# Altium footprint library KM_ALTIUM.PcbLib: 265 footprints (part 9 of 17)
Each footprint in its own frame and in the unit in brackets; x right, y up, seen from the top. Pads: shape width x height; smd on the part's side, far side on the other; paste and mask are expansions set on the pad; w line width, h text height; cw(c..) or ccw(c..) is an arc to the next point about the centre after c.
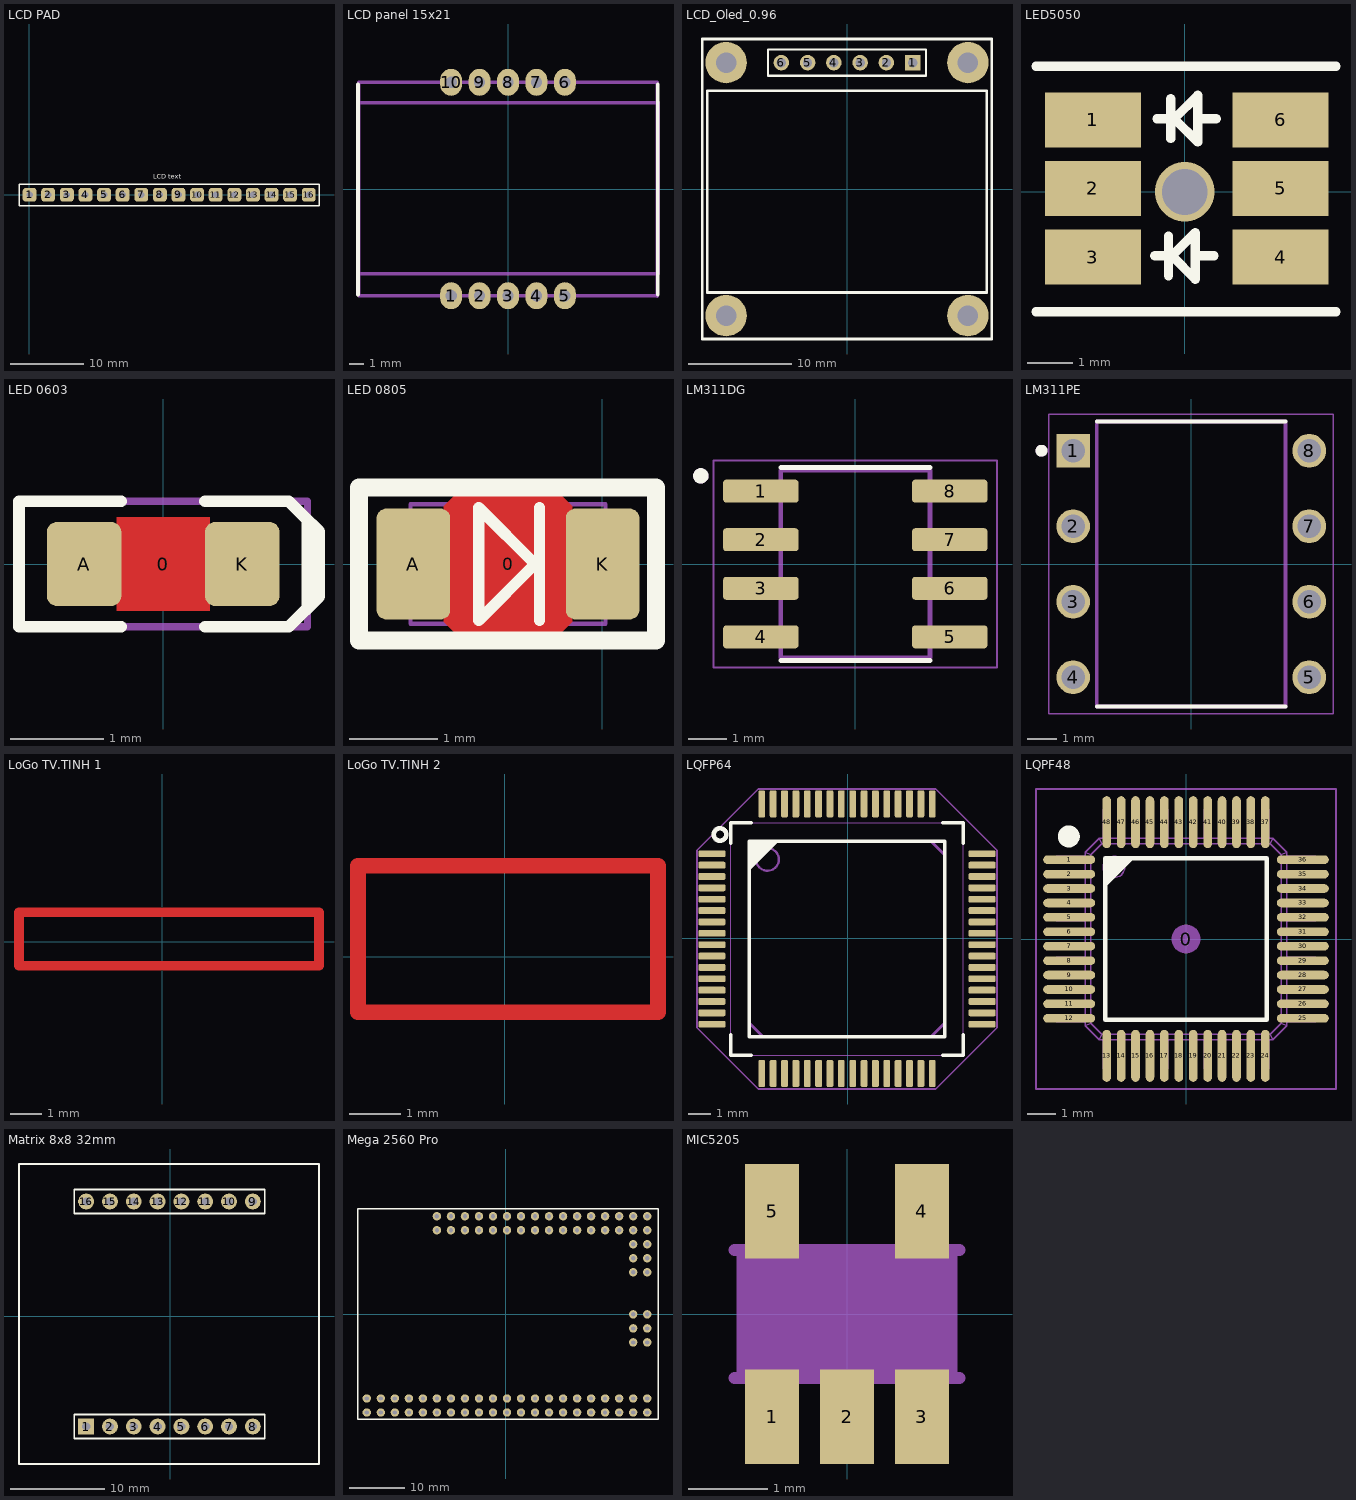
[diagram p8: the footprints below, top view; thin cyan lines are the x and y axes]

## LCD PAD [mm]
pads (16):
  rrect50% 1.905x1.905 hole 0.9: 1(0.025,0) 2(2.565,0) 3(5.105,0) 4(7.645,0) 5(10.185,0) 6(12.725,0) 7(15.265,0) 8(17.805,0) 9(20.345,0) 10(22.885,0) 11(25.425,0) 12(27.965,0) 13(30.505,0) 14(33.045,0) 15(35.585,0) 16(38.125,0)
Top Overlay:
  lines w0.2: -1.422,-1.499 39.522,-1.499 39.522,1.422 0.813,1.422 -1.422,1.422 -1.422,-1.499
  text "LCD text" at 16.891,1.93 h1.14

## LCD panel 15x21 [mm]
pads (10):
  oval 1.524x1.9 hole 0.8: 1(-4,-7.5) 2(-2,-7.5) 3(0,-7.5) 4(2,-7.5) 5(4,-7.5) 6(4,7.5) 7(2,7.5) 8(0,7.5) 9(-2,7.5) 10(-4,7.5)
Top Overlay:
  lines w0.254: -10.541,-7.417 -10.541,7.366 ; 10.516,-7.417 10.516,7.366
Mechanical 1:
  lines w0.254: -10.5,-7.5 -10.5,7.5 10.5,7.5 10.5,-7.518 10.482,-7.5 -10.5,-7.5
Mechanical 3:
  lines w0.254: -10.541,-5.944 10.541,-5.944 10.541,6.045 10.516,6.071 -10.541,6.071 -10.541,-5.944
3D body: height 3, standoff 2.8, extent -10.516,-5.969 10.566,6.096
3D body: height 2.8, standoff 2.3, extent -10.516,-7.569 10.465,7.518

## LCD_Oled_0.96 [mm]
pads (10):
  rect 1.5x1.5 hole 0.9: 1(6.35,12.217)
  round 1.5 hole 0.9: 2(3.81,12.217) 3(1.27,12.217) 4(-1.27,12.217) 5(-3.81,12.217) 6(-6.35,12.217)
  round 4 hole 2: ""(-11.684,-12.243) ""(-11.684,12.217) ""(11.684,-12.243) ""(11.684,12.217)
Top Overlay:
  lines w0.2: -7.62,10.947 -7.62,13.487 7.62,13.487 7.62,10.947 -7.62,10.947
  lines w0.254: -14,-14.5 -14,14.5 14,14.5 14,-14.5 -13.997,-14.5 ; -13.5,-10 -13.5,9.5 13.5,9.5 13.5,-10 -13.5,-10
3D body "User Library-128x64I2COLEDDisplayAdafruit.STEP": height 10.47, standoff -0.37, extent -13.299,-13.331 13.401,14.529

## LED5050 [mm]
pads (6):
  rect 2.1x1.2 smd: 1(-2.007,1.575) 2(-2.007,0.075) 3(-2.007,-1.425) 4(2.093,-1.425) 5(2.093,0.075) 6(2.093,1.575)
via 0,0 diameter 1.3 hole 1
Top Overlay:
  lines w0.203: -3.251,-2.616 3.302,-2.616 ; -3.251,2.743 3.302,2.743 ; -0.66,-1.397 -0.279,-1.397 ; -0.61,1.6 -0.229,1.6 ; -0.356,-1.829 -0.356,-0.965 ; -0.305,1.168 -0.305,2.032 ; 0.229,-1.397 0.635,-1.397 ; 0.279,1.6 0.686,1.6 ; -0.279,-1.397 0.229,-0.889 0.229,-1.905 -0.279,-1.397 ; -0.229,1.6 0.279,1.092 0.279,2.108 -0.229,1.6
3D body "User Library-LED5050.step": height 1.41, standoff -0.14, extent -2.598,-2.435 2.902,2.565

## LED 0603 [mm]
pads (3):
  round 0.254 on Mech15: 0(0,0)
  rrect25% 0.8x0.9 smd: A(-0.85,0) K(0.85,0)
Top Layer:
  pour cut-out: -0.5,0.5 0.5,0.5 0.5,-0.5 -0.5,-0.5
Top Overlay:
  lines w0.127: -0.45,-0.675 -1.55,-0.675 -1.55,0.675 -0.45,0.675 ; 0.45,-0.675 1.35,-0.675 1.55,-0.475 1.55,0.475 1.35,0.675 0.45,0.675 ; 1.5,0.525 1.675,0.35 1.675,-0.35 1.525,-0.5
Mechanical 13:
  lines w0.05: -0.6,-0.4 -0.6,0.399 0.6,0.4 0.6,-0.4 -0.6,-0.399 ; -0.505,-0.398 -0.505,0.398 ; -0.5,-0.4 -0.8,-0.4 -0.8,0.4 -0.5,0.4 ; 0.5,-0.4 0.8,-0.4 0.8,0.4 0.5,0.4 ; 0.505,-0.398 0.505,0.398 ; -0.599,-0.398 -0.599,0.398 0.599,0.398 0.599,-0.398 -0.599,-0.398
Mechanical 15:
  lines w0.076: -1.55,-0.675 1.55,-0.675 1.55,0.675 -1.55,0.675 -1.55,-0.675
3D body "LED 0603 APT1608 RED.STEP": height 0.75, standoff 0, extent -0.8,-0.4 0.8,0.4

## LED 0805 [mm] "LED SMD, Body 2.0x1.2mm, EIA 0805, IPC Medium Density"
height 0.7
pads (3):
  round 0.254 on Mech15: 0(-1.061,0)
  rrect25% 0.83x1.25 smd: A(-2.128,0) K(0.006,0)
Top Layer:
  pour cut-out: -1.786,0.65 -1.586,0.85 -0.536,0.85 -0.336,0.65 -0.336,-0.65 -0.536,-0.85 -1.586,-0.85 -1.786,-0.65
Top Overlay:
  lines w0.127: -0.705,-0.635 -0.705,0.635 ; -0.705,0 -0.756,0 ; -0.756,0 -1.391,0.635 -1.391,-0.635 -0.756,0
  lines w0.203: -2.743,-0.864 -2.743,0.864 0.61,0.864 0.61,-0.864 -2.743,-0.864
Mechanical 13:
  lines w0.05: -0.461,-0.674 -1.661,-0.674 -0.461,-0.674 ; -0.461,0.675 0.039,0.675 0.039,-0.675 -0.461,-0.675 -0.461,0.675 ; -0.461,0.674 -1.661,0.673 -0.461,0.674 ; -2.161,-0.675 -1.661,-0.675 -1.661,0.675 -2.161,0.675 -2.161,-0.675
Mechanical 15:
  lines w0.1: -2.743,-0.864 0.584,-0.864 0.584,0.838 -2.743,0.838 -2.743,-0.864
3D body "User Library-led_0805-blue.step": height 1.1, standoff 0, extent -2.071,-0.625 -0.051,0.625

## Lithium [mm]
3D body "3.7v li-ion 500mah Battery.step": height 8.36, standoff 2.31, extent -18.886,-24.8 18.886,24.8

## LM311DG [mm]
pads (8):
  rrect25% 1.97x0.6 smd: 1(-2.47,1.905) 2(-2.47,0.635) 3(-2.47,-0.635) 4(-2.47,-1.905) 5(2.47,-1.905) 6(2.47,-0.635) 7(2.47,0.635) 8(2.47,1.905)
Top Overlay:
  circle w0.2: c-4.04,2.305 r0.1
  lines w0.127: -1.95,-2.525 1.95,-2.525 ; -1.95,2.525 1.95,2.525
Mechanical 13:
  circle w0.2: c-4.04,2.305 r0.1
  lines w0.127: -1.95,-2.452 1.95,-2.452 1.95,2.452 -1.95,2.452 -1.95,-2.452
Mechanical 15:
  lines w0.05: -3.705,-2.702 3.705,-2.702 3.705,2.702 -3.705,2.702 -3.705,-2.702
3D body "step_temp.STEP": height 1.75, standoff 0, extent -2.997,-2.451 2.997,2.451

## LM311PE [mm]
pads (8):
  rect 1.13x1.13 / inner round 1.13 / far side rect 1.13x1.13 hole 0.78: 1(-3.97,3.81)
  round 1.13 hole 0.78: 2(-3.97,1.27) 3(-3.97,-1.27) 4(-3.97,-3.81) 5(3.97,-3.81) 6(3.97,-1.27) 7(3.97,1.27) 8(3.97,3.81)
Top Overlay:
  circle w0.2: c-5.035,3.81 r0.1
  lines w0.127: -3.175,-4.795 3.175,-4.795 ; -3.175,4.795 3.175,4.795
Mechanical 13:
  circle w0.2: c-5.035,3.81 r0.1
  lines w0.127: -3.175,-4.795 -3.175,4.795 3.175,4.795 3.175,-4.795 -3.175,-4.795
Mechanical 15:
  lines w0.05: -4.785,-5.045 -4.785,5.045 4.785,5.045 4.785,-5.045 -4.785,-5.045
3D body "step_temp.STEP": height 5.08, standoff -3.81, extent -3.937,-4.794 3.937,4.794

## LoGo TV.TINH 1 [mm]
Top Layer:
  lines w0.305: -4.572,-0.762 5.004,-0.762 5.004,0.94 -4.572,0.94 -4.572,-0.762
  text "fb.com/tv.tinh" at -4.216,-0.356 h1.52

## LoGo TV.TINH 2 [mm]
Top Layer:
  lines w0.305: -2.87,-1.092 2.997,-1.092 2.997,1.778 -2.87,1.778 -2.87,-1.092
  text "tv.tinh" at -2.083,-0.787 h1.52
  text "fb.com/" at -2.565,0.356 h1.52

## LQFP64 [mm]
pads (64):
  rrect50% 1.2x0.3 smd: 1(-5.969,3.725) 2(-5.969,3.225) 3(-5.969,2.725) 4(-5.969,2.225) 5(-5.969,1.725) 6(-5.969,1.225) 7(-5.969,0.725) 8(-5.969,0.225) 9(-5.969,-0.275) 10(-5.969,-0.775) 11(-5.969,-1.275) 12(-5.969,-1.775) 13(-5.969,-2.275) 14(-5.969,-2.775) 15(-5.969,-3.275) 16(-5.969,-3.775) 33(5.919,-3.775) 34(5.919,-3.275) 35(5.919,-2.775) 36(5.919,-2.275) 37(5.919,-1.775) 38(5.919,-1.275) 39(5.919,-0.775) 40(5.919,-0.275) 41(5.919,0.225) 42(5.919,0.725) 43(5.919,1.225) 44(5.919,1.725) 45(5.919,2.225) 46(5.919,2.725) 47(5.919,3.225) 48(5.919,3.725)
  rrect50% 0.3x1.2 smd: 17(-3.775,-5.944) 18(-3.275,-5.944) 19(-2.775,-5.944) 20(-2.275,-5.944) 21(-1.775,-5.944) 22(-1.275,-5.944) 23(-0.775,-5.944) 24(-0.275,-5.944) 25(0.225,-5.944) 26(0.725,-5.944) 27(1.225,-5.944) 28(1.725,-5.944) 29(2.225,-5.944) 30(2.725,-5.944) 31(3.225,-5.944) 32(3.725,-5.944) 49(3.725,5.919) 50(3.225,5.919) 51(2.725,5.919) 52(2.225,5.919) 53(1.725,5.919) 54(1.225,5.919) 55(0.725,5.919) 56(0.225,5.919) 57(-0.275,5.919) 58(-0.775,5.919) 59(-1.275,5.919) 60(-1.775,5.919) 61(-2.275,5.919) 62(-2.775,5.919) 63(-3.275,5.919) 64(-3.775,5.919)
Top Overlay:
  circle w0.203: c-5.613,4.572 r0.275
  region: -4.319,4.269 -3.031,4.269 -4.319,2.981
  lines w0.152: -5.131,-4.242 -5.131,-5.131 -4.242,-5.131 ; -5.131,4.191 -5.131,5.08 -4.242,5.08 ; 4.191,-5.131 5.08,-5.131 5.08,-4.242 ; 4.191,5.08 5.08,5.08 5.08,4.191 ; -4.325,-4.325 4.275,-4.325 4.275,4.275 -4.325,4.275 -4.325,-4.325
Mechanical 13:
  circle w0.1: c-3.525,3.475 r0.5
  lines w0.127: -4.325,-3.725 -3.725,-4.325 3.675,-4.325 4.275,-3.725 4.275,3.675 3.675,4.275 -3.725,4.275 -4.325,3.675 -4.325,-3.725
Mechanical 15:
  lines w0.076: -6.625,-3.925 -3.925,-6.625 3.875,-6.625 6.575,-3.925 6.575,3.875 3.875,6.575 -3.925,6.575 -6.625,3.875 -6.625,-3.925
Mechanical 16:
  lines w0: -5.131,-5.131 -5.131,5.08 5.08,5.08 5.08,-5.131 -5.131,-5.131
3D body "LQFP50P1200X1200X160-64.STEP": height 1.59, standoff -0.01, extent -6.125,-6.125 6.075,6.075

## LQPF48 [mm]
pads (49):
  round 1 on Mech15: 0(0,0)
  oval 1.8x0.3 smd: 1(-4.05,2.75) 2(-4.05,2.25) 3(-4.05,1.75) 4(-4.05,1.25) 5(-4.05,0.75) 6(-4.05,0.25) 7(-4.05,-0.25) 8(-4.05,-0.75) 9(-4.05,-1.25) 10(-4.05,-1.75) 11(-4.05,-2.25) 12(-4.05,-2.75) 25(4.05,-2.75) 26(4.05,-2.25) 27(4.05,-1.75) 28(4.05,-1.25) 29(4.05,-0.75) 30(4.05,-0.25) 31(4.05,0.25) 32(4.05,0.75) 33(4.05,1.25) 34(4.05,1.75) 35(4.05,2.25) 36(4.05,2.75)
  oval 0.3x1.8 smd: 13(-2.75,-4.05) 14(-2.25,-4.05) 15(-1.75,-4.05) 16(-1.25,-4.05) 17(-0.75,-4.05) 18(-0.25,-4.05) 19(0.25,-4.05) 20(0.75,-4.05) 21(1.25,-4.05) 22(1.75,-4.05) 23(2.25,-4.05) 24(2.75,-4.05) 37(2.75,4.05) 38(2.25,4.05) 39(1.75,4.05) 40(1.25,4.05) 41(0.75,4.05) 42(0.25,4.05) 43(-0.25,4.05) 44(-0.75,4.05) 45(-1.25,4.05) 46(-1.75,4.05) 47(-2.25,4.05) 48(-2.75,4.05)
Top Overlay:
  circle w0.381: c-4.064,3.556 r0.191
  region: -2.794,2.794 -1.794,2.794 -2.794,1.794
  lines w0.152: -2.794,-2.794 2.794,-2.794 2.794,2.794 -2.794,2.794 -2.794,-2.794
Mechanical 13:
  drawing of 361 lines, arcs and shapes, not listed
Mechanical 15:
  lines w0.076: -5.2,-5.2 5.2,-5.2 5.2,5.2 -5.2,5.2 -5.2,-5.2
3D body "LQFP-48.STEP": height 1.59, standoff -0.01, extent -4.5,-4.5 4.5,4.5

## Matrix 8x8 32mm [mm]
pads (16):
  rect 1.7x1.7 hole 0.9: 1(-8.966,-11.771)
  round 1.7 hole 0.9: 2(-6.426,-11.771) 3(-3.886,-11.771) 4(-1.346,-11.771) 5(1.194,-11.771) 6(3.734,-11.771) 7(6.274,-11.771) 8(8.814,-11.771) 9(8.814,12.229) 10(6.274,12.229) 11(3.734,12.229) 12(1.194,12.229) 13(-1.346,12.229) 14(-3.886,12.229) 15(-6.426,12.229) 16(-8.966,12.229)
Top Overlay:
  lines w0.2: -10.236,-13.041 10.084,-13.041 10.084,-10.501 -10.236,-10.501 -10.236,-13.041 ; -10.236,10.959 -10.236,13.499 10.084,13.499 10.084,10.959 -10.236,10.959
  lines w0.254: -16.129,-15.771 15.871,-15.771 15.871,16.229 -16.129,16.229 -16.129,-15.771
3D body "User Library-Bicolor-LED-Matrix.STEP": height 5.51, standoff -8.49, extent -16.127,-15.797 15.873,16.203

## Mega 2560 Pro [mil] "Module"
pads (86):
  round 60 hole 30: 3V3(-692.13,-700) 3V3(-692.13,-600) 5V(-792.13,-700) 5V(-792.13,-600) 5V(1007.87,0) A1(-492.13,600) A2(-392.13,700) A3(-392.13,600) A4(-292.13,700) A5(-292.13,600) A6(-192.13,700) A7(-192.13,600) A8(-92.13,700) A9(-92.13,600) A10(7.87,700) A11(7.87,600) A12(107.87,700) A13(107.87,600) A14(207.87,700) A15(207.87,600) AREF(-592.13,-600) D2(-392.13,-600) D3(-392.13,-700) D4(-292.13,-600) D5(-292.13,-700) D6(-192.13,-600) D7(-192.13,-700) D8(-92.13,-600) D9(-92.13,-700) D10(7.87,-600) D11(7.87,-700) D12(107.87,-600) D13(107.87,-700) D14(207.87,-600) D15(207.87,-700) D16(307.87,-600) D17(307.87,-700) D18(407.87,-600) D19(407.87,-700) D20(507.87,-600) D21(507.87,-700) D22(607.87,-600) D23(607.87,-700) D24(707.87,-600) D25(707.87,-700) D26(807.87,-600) D27(807.87,-700) D28(907.87,-600) D29(907.87,-700) D30(1007.87,-600) D31(1007.87,-700) D32(307.87,700) D33(307.87,600) D34(407.87,700) D35(407.87,600) D36(507.87,700) D37(507.87,600) D38(607.87,700) D39(607.87,600) D40(707.87,700) D41(707.87,600) D42(807.87,700) D43(807.87,600) D44(907.87,700) D45(907.87,600) D46(1007.87,700) D47(1007.87,600) D48(1007.87,500) D49(907.87,500) D50(1007.87,400) D51(907.87,400) D52(1007.87,300) D53(907.87,300) GND(-892.13,-700) GND(-892.13,-600) GND(1007.87,-200) MI(907.87,0) MO(1007.87,-100) RS(907.87,-200) RST(-592.13,-700) RX(-492.13,-600) SCK(907.87,-100) TX(-492.13,-700) VIN(-992.13,-700) VIN(-992.13,-600)
  round 60 hole 31.5: A0(-492.13,700)
Top Overlay:
  lines w10: -1055,-750 -1055,-745 -1055,755 1085,755 1085,-750 -1050,-750 -1055,-750
3D body "MEGA 2560 PRO mini.step": height 502.58, standoff -233.86, extent -1047.25,-750 1078.74,750

## MIC5205 [mm] "KB33-3.3"
pads (5):
  rect 0.69x1.2 smd: 1(-0.95,-1.3) 2(0,-1.3) 3(0.95,-1.3) 4(0.95,1.3) 5(-0.95,1.3)
Mechanical 13:
  region: -0.7,0.85 -1.201,0.85 -1.201,1.5 -0.7,1.5
  region: 1.2,0.851 0.701,0.851 0.701,1.5 1.2,1.5
  region: 1.2,-1.502 0.701,-1.502 0.701,-0.85 1.2,-0.85
  region: 0.25,-1.502 -0.25,-1.502 -0.25,-0.85 0.25,-0.85
  region: -0.7,-1.5 -1.2,-1.5 -1.2,-0.85 -0.7,-0.85
  lines w0.152: -1.422,-0.81 1.422,-0.81 ; -1.422,0.81 1.422,0.81
Mechanical 15:
  region: 1.397,-0.762 -1.397,-0.762 -1.397,0.762 1.397,0.762
3D body "MIC5205-3.3YM5-TR.STEP": height 1.45, standoff 0, extent -1.45,-1.35 1.45,1.35